# Altium footprint library WR-TBL_Pluggable Connector_5.08mm.PcbLib: 295 footprints (part 7 of 19)
Each footprint in its own frame and in the unit in brackets; x right, y up, seen from the top. Pads: shape width x height; smd on the part's side, far side on the other; paste and mask are expansions set on the pad; w line width, h text height; cw(c..) or ccw(c..) is an arc to the next point about the centre after c.
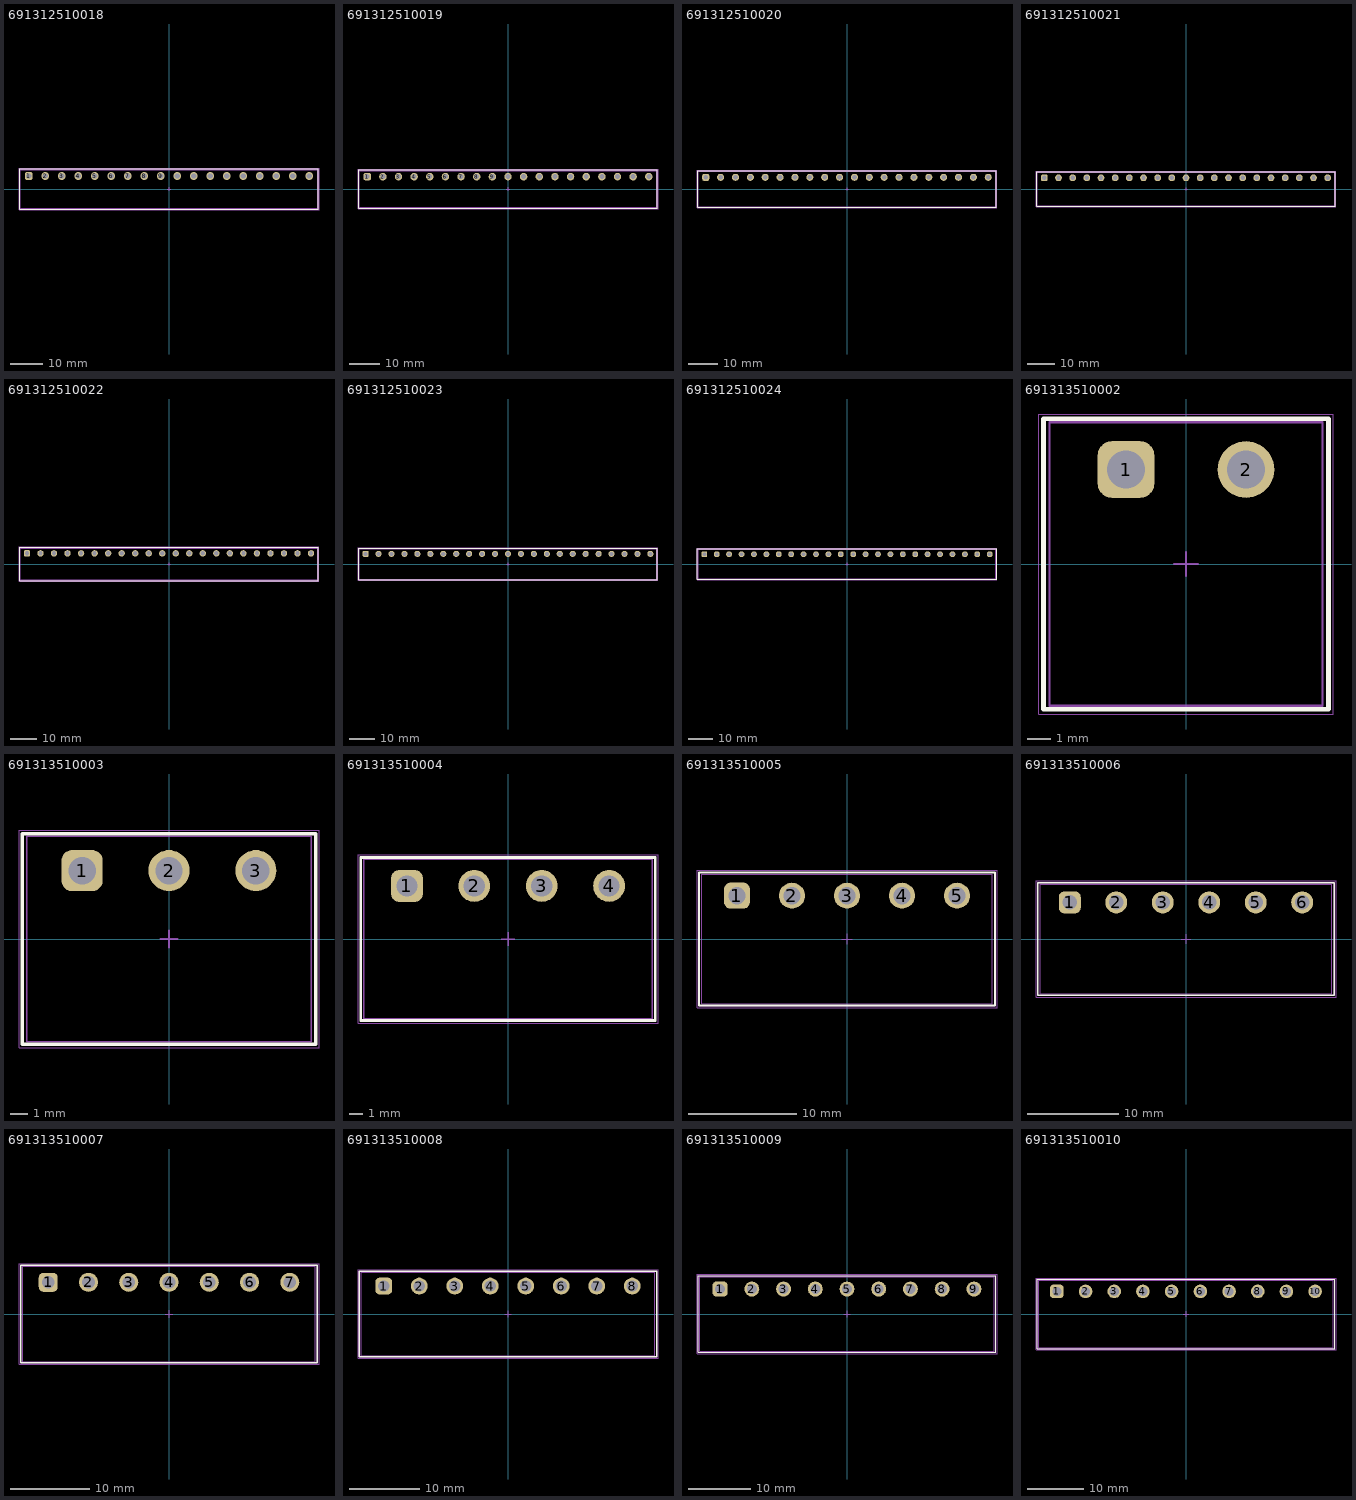
[diagram p6: the footprints below, top view; thin cyan lines are the x and y axes]

## 691312510018 [mm] "5,08mm - PCB Headers - Horizontal - Opened ends - 18p"
height 7.8
pads (18):
  rrect50% 2.4x2.4 hole 1.6: 1(-43.18,4)
  round 2.4 hole 1.6: 2(-38.1,4) 3(-33.02,4) 4(-27.94,4) 5(-22.86,4) 6(-17.78,4) 7(-12.7,4) 8(-7.62,4) 9(-2.54,4) 10(2.54,4) 11(7.62,4) 12(12.7,4) 13(17.78,4) 14(22.86,4) 15(27.94,4) 16(33.02,4) 17(38.1,4) 18(43.18,4)
Top Overlay:
  lines w0.2: -45.97,-6.25 45.97,-6.25 45.97,6.25 -45.97,6.25 -45.97,-6.25
Top Assembly:
  lines w0.1: -45.97,-6.25 -45.97,6.25 45.97,6.25 45.97,-6.25 -45.97,-6.25
Top Designator:
  text ".Designator" at -3.647,-0.357 h1
Top 3D Body:
  lines w0.1: -45.72,-6 45.72,-6 45.72,6 -45.72,6 -45.72,-6
Top Courtyard:
  lines w0.05: -46.17,-6.45 46.17,-6.45 46.17,6.45 -46.17,6.45 -46.17,-6.45
Top Component Center:
  lines w0.1: -0.5,0 0.5,0 ; 0,-0.5 0,0.5
3D body "691312510018.stp": height 8.7, standoff -3.8, extent -45.72,-6 45.72,6

## 691312510019 [mm] "5,08mm - PCB Headers - Horizontal - Opened ends - 19p"
height 7.8
pads (19):
  rrect50% 2.4x2.4 hole 1.6: 1(-45.72,4)
  round 2.4 hole 1.6: 2(-40.64,4) 3(-35.56,4) 4(-30.48,4) 5(-25.4,4) 6(-20.32,4) 7(-15.24,4) 8(-10.16,4) 9(-5.08,4) 10(0,4) 11(5.08,4) 12(10.16,4) 13(15.24,4) 14(20.32,4) 15(25.4,4) 16(30.48,4) 17(35.56,4) 18(40.64,4) 19(45.72,4)
Top Overlay:
  lines w0.2: -48.51,-6.25 48.51,-6.25 48.51,6.25 -48.51,6.25 -48.51,-6.25
Top Assembly:
  lines w0.1: -48.51,-6.25 -48.51,6.25 48.51,6.25 48.51,-6.25 -48.51,-6.25
Top Designator:
  text ".Designator" at -3.647,-0.357 h1
Top 3D Body:
  lines w0.1: -48.26,-6 48.26,-6 48.26,6 -48.26,6 -48.26,-6
Top Courtyard:
  lines w0.05: -48.71,-6.45 48.71,-6.45 48.71,6.45 -48.71,6.45 -48.71,-6.45
Top Component Center:
  lines w0.1: -0.5,0 0.5,0 ; 0,-0.5 0,0.5
3D body "691312510019.stp": height 8.7, standoff -3.8, extent -48.26,-6 48.26,6

## 691312510020 [mm] "5,08mm - PCB Headers - Horizontal - Opened ends - 20p"
height 7.8
pads (20):
  rrect50% 2.4x2.4 hole 1.6: 1(-48.26,4)
  round 2.4 hole 1.6: 2(-43.18,4) 3(-38.1,4) 4(-33.02,4) 5(-27.94,4) 6(-22.86,4) 7(-17.78,4) 8(-12.7,4) 9(-7.62,4) 10(-2.54,4) 11(2.54,4) 12(7.62,4) 13(12.7,4) 14(17.78,4) 15(22.86,4) 16(27.94,4) 17(33.02,4) 18(38.1,4) 19(43.18,4) 20(48.26,4)
Top Overlay:
  lines w0.2: -51.05,-6.25 51.05,-6.25 51.05,6.25 -51.05,6.25 -51.05,-6.25
Top Assembly:
  lines w0.1: -51.05,-6.25 -51.05,6.25 51.05,6.25 51.05,-6.25 -51.05,-6.25
Top Designator:
  text ".Designator" at -3.647,-0.357 h1
Top 3D Body:
  lines w0.1: -50.8,-6 50.8,-6 50.8,6 -50.8,6 -50.8,-6
Top Courtyard:
  lines w0.05: -51.25,-6.45 51.25,-6.45 51.25,6.45 -51.25,6.45 -51.25,-6.45
Top Component Center:
  lines w0.1: -0.5,0 0.5,0 ; 0,-0.5 0,0.5
3D body "691312510020.stp": height 8.7, standoff -3.8, extent -50.8,-6 50.8,6

## 691312510021 [mm] "5,08mm - PCB Headers - Horizontal - Opened ends - 21p"
height 7.8
pads (21):
  rrect50% 2.4x2.4 hole 1.6: 1(-50.8,4)
  round 2.4 hole 1.6: 2(-45.72,4) 3(-40.64,4) 4(-35.56,4) 5(-30.48,4) 6(-25.4,4) 7(-20.32,4) 8(-15.24,4) 9(-10.16,4) 10(-5.08,4) 11(0,4) 12(5.08,4) 13(10.16,4) 14(15.24,4) 15(20.32,4) 16(25.4,4) 17(30.48,4) 18(35.56,4) 19(40.64,4) 20(45.72,4) 21(50.8,4)
Top Overlay:
  lines w0.2: -53.59,-6.25 53.59,-6.25 53.59,6.25 -53.59,6.25 -53.59,-6.25
Top Assembly:
  lines w0.1: -53.59,-6.25 -53.59,6.25 53.59,6.25 53.59,-6.25 -53.59,-6.25
Top Designator:
  text ".Designator" at -3.647,-0.357 h1
Top 3D Body:
  lines w0.1: -53.34,-6 53.34,-6 53.34,6 -53.34,6 -53.34,-6
Top Courtyard:
  lines w0.05: -53.79,-6.45 53.79,-6.45 53.79,6.45 -53.79,6.45 -53.79,-6.45
Top Component Center:
  lines w0.1: -0.5,0 0.5,0 ; 0,-0.5 0,0.5
3D body "691312510021.stp": height 8.7, standoff -3.8, extent -53.34,-6 53.34,6

## 691312510022 [mm] "5,08mm - PCB Headers - Horizontal - Opened ends - 22p"
height 7.8
pads (22):
  rrect50% 2.4x2.4 hole 1.6: 1(-53.34,4)
  round 2.4 hole 1.6: 2(-48.26,4) 3(-43.18,4) 4(-38.1,4) 5(-33.02,4) 6(-27.94,4) 7(-22.86,4) 8(-17.78,4) 9(-12.7,4) 10(-7.62,4) 11(-2.54,4) 12(2.54,4) 13(7.62,4) 14(12.7,4) 15(17.78,4) 16(22.86,4) 17(27.94,4) 18(33.02,4) 19(38.1,4) 20(43.18,4) 21(48.26,4) 22(53.34,4)
Top Overlay:
  lines w0.2: -56.13,-6.25 56.13,-6.25 56.13,6.25 -56.13,6.25 -56.13,-6.25
Top Assembly:
  lines w0.1: -56.13,-6.25 -56.13,6.25 56.13,6.25 56.13,-6.25 -56.13,-6.25
Top Designator:
  text ".Designator" at -3.647,-0.357 h1
Top 3D Body:
  lines w0.1: -55.88,-6 55.88,-6 55.88,6 -55.88,6 -55.88,-6
Top Courtyard:
  lines w0.05: -56.33,-6.45 56.33,-6.45 56.33,6.45 -56.33,6.45 -56.33,-6.45
Top Component Center:
  lines w0.1: -0.5,0 0.5,0 ; 0,-0.5 0,0.5
3D body "691312510022.stp": height 8.7, standoff -3.8, extent -55.88,-6 55.88,6

## 691312510023 [mm] "5,08mm - PCB Headers - Horizontal - Opened ends - 23p"
height 7.8
pads (23):
  rrect50% 2.4x2.4 hole 1.6: 1(-55.88,4)
  round 2.4 hole 1.6: 2(-50.8,4) 3(-45.72,4) 4(-40.64,4) 5(-35.56,4) 6(-30.48,4) 7(-25.4,4) 8(-20.32,4) 9(-15.24,4) 10(-10.16,4) 11(-5.08,4) 12(0,4) 13(5.08,4) 14(10.16,4) 15(15.24,4) 16(20.32,4) 17(25.4,4) 18(30.48,4) 19(35.56,4) 20(40.64,4) 21(45.72,4) 22(50.8,4) 23(55.88,4)
Top Overlay:
  lines w0.2: -58.67,-6.25 58.67,-6.25 58.67,6.25 -58.67,6.25 -58.67,-6.25
Top Assembly:
  lines w0.1: -58.67,-6.25 -58.67,6.25 58.67,6.25 58.67,-6.25 -58.67,-6.25
Top Designator:
  text ".Designator" at -3.647,-0.357 h1
Top 3D Body:
  lines w0.1: -58.42,-6 58.42,-6 58.42,6 -58.42,6 -58.42,-6
Top Courtyard:
  lines w0.05: -58.87,-6.45 58.87,-6.45 58.87,6.45 -58.87,6.45 -58.87,-6.45
Top Component Center:
  lines w0.1: -0.5,0 0.5,0 ; 0,-0.5 0,0.5
3D body "691312510023.stp": height 8.7, standoff -3.8, extent -58.42,-6 58.42,6

## 691312510024 [mm] "5,08mm - PCB Headers - Horizontal - Opened ends - 24p"
height 7.8
pads (24):
  rrect50% 2.4x2.4 hole 1.6: 1(-58.42,4)
  round 2.4 hole 1.6: 2(-53.34,4) 3(-48.26,4) 4(-43.18,4) 5(-38.1,4) 6(-33.02,4) 7(-27.94,4) 8(-22.86,4) 9(-17.78,4) 10(-12.7,4) 11(-7.62,4) 12(-2.54,4) 13(2.54,4) 14(7.62,4) 15(12.7,4) 16(17.78,4) 17(22.86,4) 18(27.94,4) 19(33.02,4) 20(38.1,4) 21(43.18,4) 22(48.26,4) 23(53.34,4) 24(58.42,4)
Top Overlay:
  lines w0.2: -61.21,-6.25 -61.21,6.25 61.21,6.25 61.21,-6.25 -61.21,-6.25
Top Assembly:
  lines w0.1: -61.21,-6.25 61.21,-6.25 61.21,6.25 -61.21,6.25 -61.21,-6.25
Top Designator:
  text ".Designator" at -3.647,-0.357 h1
Top 3D Body:
  lines w0.1: -60.96,-6 -60.96,6 60.96,6 60.96,-6 -60.96,-6
Top Courtyard:
  lines w0.05: -61.41,-6.45 -61.41,6.45 61.41,6.45 61.41,-6.45 -61.41,-6.45
Top Component Center:
  lines w0.1: -0.5,0 0.5,0 ; 0,-0.5 0,0.5
3D body "691312510024.stp": height 8.55, standoff -3.45, extent -60.96,-6 60.96,6

## 691313510002 [mm] "5,08mm - PCB Headers - Horizontal - Closed ends - 02p"
height 7.8
pads (2):
  rrect50% 2.4x2.4 hole 1.6: 1(-2.54,4)
  round 2.4 hole 1.6: 2(2.54,4)
Top Overlay:
  lines w0.2: -6.03,-6.15 6.03,-6.15 6.03,6.15 -6.03,6.15 -6.03,-6.15
Top Assembly:
  lines w0.1: -6.03,-6.15 -6.03,6.15 6.03,6.15 6.03,-6.15 -6.03,-6.15
Top Designator:
  text ".Designator" at -3.647,-0.357 h1
Top 3D Body:
  lines w0.1: -5.78,-6 5.78,-6 5.78,6 -5.78,6 -5.78,-6
Top Courtyard:
  lines w0.05: -6.23,-6.35 6.23,-6.35 6.23,6.35 -6.23,6.35 -6.23,-6.35
Top Component Center:
  lines w0.1: -0.5,0 0.5,0 ; 0,-0.5 0,0.5
3D body "691313510002.stp": height 8.7, standoff -3.8, extent -5.78,-6 5.78,6

## 691313510003 [mm] "5,08mm - PCB Headers - Horizontal - Closed ends - 03p"
height 7.8
pads (3):
  rrect50% 2.4x2.4 hole 1.6: 1(-5.08,4)
  round 2.4 hole 1.6: 2(0,4) 3(5.08,4)
Top Overlay:
  lines w0.2: -8.57,-6.15 8.57,-6.15 8.57,6.15 -8.57,6.15 -8.57,-6.15
Top Assembly:
  lines w0.1: -8.57,-6.15 -8.57,6.15 8.57,6.15 8.57,-6.15 -8.57,-6.15
Top Designator:
  text ".Designator" at -3.647,-0.357 h1
Top 3D Body:
  lines w0.1: -8.32,-6 8.32,-6 8.32,6 -8.32,6 -8.32,-6
Top Courtyard:
  lines w0.05: -8.77,-6.35 8.77,-6.35 8.77,6.35 -8.77,6.35 -8.77,-6.35
Top Component Center:
  lines w0.1: -0.5,0 0.5,0 ; 0,-0.5 0,0.5
3D body "691313510003.stp": height 8.7, standoff -3.8, extent -8.32,-6 8.32,6

## 691313510004 [mm] "5,08mm - PCB Headers - Horizontal - Closed ends - 04p"
height 7.8
pads (4):
  rrect50% 2.4x2.4 hole 1.6: 1(-7.62,4)
  round 2.4 hole 1.6: 2(-2.54,4) 3(2.54,4) 4(7.62,4)
Top Overlay:
  lines w0.2: -11.11,-6.15 -11.11,6.15 11.11,6.15 11.11,-6.15 -11.11,-6.15
Top Assembly:
  lines w0.1: -11.11,-6.15 11.11,-6.15 11.11,6.15 -11.11,6.15 -11.11,-6.15
Top Designator:
  text ".Designator" at -3.647,-0.357 h1
Top 3D Body:
  lines w0.1: -10.86,-6 -10.86,6 10.86,6 10.86,-6 -10.86,-6
Top Courtyard:
  lines w0.05: -11.31,-6.35 -11.31,6.35 11.31,6.35 11.31,-6.35 -11.31,-6.35
Top Component Center:
  lines w0.1: -0.5,0 0.5,0 ; 0,-0.5 0,0.5
3D body "691313510004.stp": height 8.7, standoff -3.8, extent -10.86,-6 10.86,6

## 691313510005 [mm] "5,08mm - PCB Headers - Horizontal - Closed ends - 05p"
height 7.8
pads (5):
  rrect50% 2.4x2.4 hole 1.6: 1(-10.16,4)
  round 2.4 hole 1.6: 2(-5.08,4) 3(0,4) 4(5.08,4) 5(10.16,4)
Top Overlay:
  lines w0.2: -13.65,-6.15 13.65,-6.15 13.65,6.15 -13.65,6.15 -13.65,-6.15
Top Assembly:
  lines w0.1: -13.65,-6.15 -13.65,6.15 13.65,6.15 13.65,-6.15 -13.65,-6.15
Top Designator:
  text ".Designator" at -3.647,-0.357 h1
Top 3D Body:
  lines w0.1: -13.4,-6 13.4,-6 13.4,6 -13.4,6 -13.4,-6
Top Courtyard:
  lines w0.05: -13.85,-6.35 13.85,-6.35 13.85,6.35 -13.85,6.35 -13.85,-6.35
Top Component Center:
  lines w0.1: -0.5,0 0.5,0 ; 0,-0.5 0,0.5
3D body "691313510005.stp": height 8.7, standoff -3.8, extent -13.4,-6 13.4,6

## 691313510006 [mm] "5,08mm - PCB Headers - Horizontal - Closed ends - 06p"
height 7.8
pads (6):
  rrect50% 2.4x2.4 hole 1.6: 1(-12.7,4)
  round 2.4 hole 1.6: 2(-7.62,4) 3(-2.54,4) 4(2.54,4) 5(7.62,4) 6(12.7,4)
Top Overlay:
  lines w0.2: -16.19,-6.15 -16.19,6.15 16.19,6.15 16.19,-6.15 -16.19,-6.15
Top Assembly:
  lines w0.1: -16.19,-6.15 16.19,-6.15 16.19,6.15 -16.19,6.15 -16.19,-6.15
Top Designator:
  text ".Designator" at -3.647,-0.357 h1
Top 3D Body:
  lines w0.1: -15.94,-6 -15.94,6 15.94,6 15.94,-6 -15.94,-6
Top Courtyard:
  lines w0.05: -16.39,-6.35 -16.39,6.35 16.39,6.35 16.39,-6.35 -16.39,-6.35
Top Component Center:
  lines w0.1: -0.5,0 0.5,0 ; 0,-0.5 0,0.5
3D body "691313510006.stp": height 8.7, standoff -3.8, extent -15.94,-6 15.94,6

## 691313510007 [mm] "5,08mm - PCB Headers - Horizontal - Closed ends - 07p"
height 7.8
pads (7):
  rrect50% 2.4x2.4 hole 1.6: 1(-15.24,4)
  round 2.4 hole 1.6: 2(-10.16,4) 3(-5.08,4) 4(0,4) 5(5.08,4) 6(10.16,4) 7(15.24,4)
Top Overlay:
  lines w0.2: -18.73,-6.15 -18.73,6.15 18.73,6.15 18.73,-6.15 -18.73,-6.15
Top Assembly:
  lines w0.1: -18.73,-6.15 18.73,-6.15 18.73,6.15 -18.73,6.15 -18.73,-6.15
Top Designator:
  text ".Designator" at -3.647,-0.357 h1
Top 3D Body:
  lines w0.1: -18.48,-6 -18.48,6 18.48,6 18.48,-6 -18.48,-6
Top Courtyard:
  lines w0.05: -18.93,-6.35 -18.93,6.35 18.93,6.35 18.93,-6.35 -18.93,-6.35
Top Component Center:
  lines w0.1: -0.5,0 0.5,0 ; 0,-0.5 0,0.5
3D body "691313510007.stp": height 8.7, standoff -3.8, extent -18.48,-6 18.48,6

## 691313510008 [mm] "5,08mm - PCB Headers - Horizontal - Closed ends - 08p"
height 7.8
pads (8):
  rrect50% 2.4x2.4 hole 1.6: 1(-17.78,4)
  round 2.4 hole 1.6: 2(-12.7,4) 3(-7.62,4) 4(-2.54,4) 5(2.54,4) 6(7.62,4) 7(12.7,4) 8(17.78,4)
Top Overlay:
  lines w0.2: -21.27,-6.15 -21.27,6.15 21.27,6.15 21.27,-6.15 -21.27,-6.15
Top Assembly:
  lines w0.1: -21.27,-6.15 21.27,-6.15 21.27,6.15 -21.27,6.15 -21.27,-6.15
Top Designator:
  text ".Designator" at -3.647,-0.357 h1
Top 3D Body:
  lines w0.1: -21.02,-6 -21.02,6 21.02,6 21.02,-6 -21.02,-6
Top Courtyard:
  lines w0.05: -21.47,-6.35 -21.47,6.35 21.47,6.35 21.47,-6.35 -21.47,-6.35
Top Component Center:
  lines w0.1: -0.5,0 0.5,0 ; 0,-0.5 0,0.5
3D body "691313510008.stp": height 8.7, standoff -3.8, extent -21.02,-6 21.02,6

## 691313510009 [mm] "5,08mm - PCB Headers - Horizontal - Closed ends - 09p"
height 7.8
pads (9):
  rrect50% 2.4x2.4 hole 1.6: 1(-20.32,4)
  round 2.4 hole 1.6: 2(-15.24,4) 3(-10.16,4) 4(-5.08,4) 5(0,4) 6(5.08,4) 7(10.16,4) 8(15.24,4) 9(20.32,4)
Top Overlay:
  lines w0.2: -23.81,-6.15 -23.81,6.15 23.81,6.15 23.81,-6.15 -23.81,-6.15
Top Assembly:
  lines w0.1: -23.81,-6.15 23.81,-6.15 23.81,6.15 -23.81,6.15 -23.81,-6.15
Top Designator:
  text ".Designator" at -3.647,-0.357 h1
Top 3D Body:
  lines w0.1: -23.56,-6 -23.56,6 23.56,6 23.56,-6 -23.56,-6
Top Courtyard:
  lines w0.05: -24.01,-6.35 -24.01,6.35 24.01,6.35 24.01,-6.35 -24.01,-6.35
Top Component Center:
  lines w0.1: -0.5,0 0.5,0 ; 0,-0.5 0,0.5
3D body "691313510009.stp": height 8.7, standoff -3.8, extent -23.56,-6 23.56,6

## 691313510010 [mm] "5,08mm - PCB Headers - Horizontal - Closed ends - 10p"
height 7.8
pads (10):
  rrect50% 2.4x2.4 hole 1.6: 1(-22.86,4)
  round 2.4 hole 1.6: 2(-17.78,4) 3(-12.7,4) 4(-7.62,4) 5(-2.54,4) 6(2.54,4) 7(7.62,4) 8(12.7,4) 9(17.78,4) 10(22.86,4)
Top Overlay:
  lines w0.2: -26.35,-6.15 -26.35,6.15 26.35,6.15 26.35,-6.15 -26.35,-6.15
Top Assembly:
  lines w0.1: -26.35,-6.15 26.35,-6.15 26.35,6.15 -26.35,6.15 -26.35,-6.15
Top Designator:
  text ".Designator" at -3.647,-0.357 h1
Top 3D Body:
  lines w0.1: -26.1,-6 -26.1,6 26.1,6 26.1,-6 -26.1,-6
Top Courtyard:
  lines w0.05: -26.55,-6.35 -26.55,6.35 26.55,6.35 26.55,-6.35 -26.55,-6.35
Top Component Center:
  lines w0.1: -0.5,0 0.5,0 ; 0,-0.5 0,0.5
3D body "691313510010.stp": height 8.7, standoff -3.8, extent -26.1,-6 26.1,6